# Altium footprint library 2019-09-10_11-11-09.PcbLib: 3 footprints
Each footprint in its own frame and in the unit in brackets; x right, y up, seen from the top. Pads: shape width x height; smd on the part's side, far side on the other; paste and mask are expansions set on the pad; w line width, h text height; cw(c..) or ccw(c..) is an arc to the next point about the centre after c.
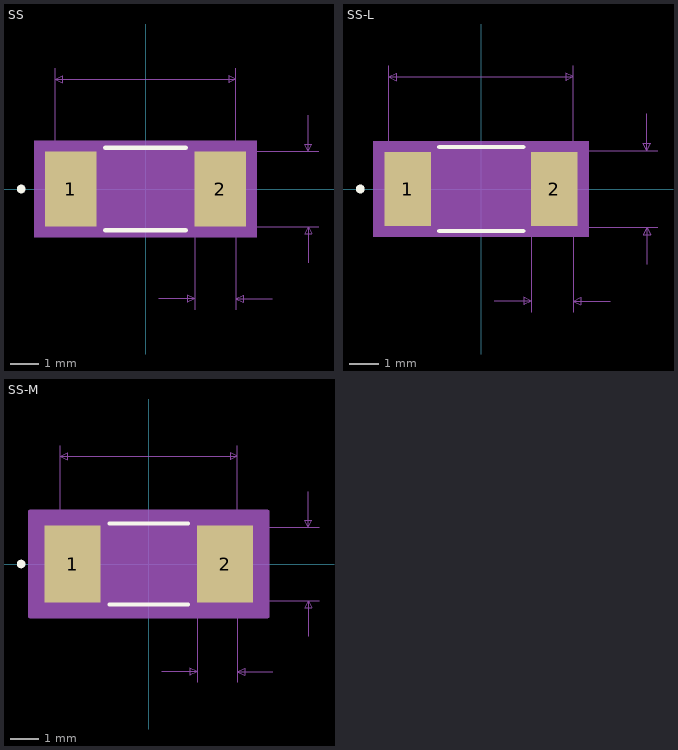
[diagram p0: the footprints below, top view; thin cyan lines are the x and y axes]

## SS [mil]
pads (2):
  rect 71x104 smd paste+0 mask+0: 1(-103.5,0) 2(103.5,0)
Top Overlay:
  circle w6: c-172,0 r3
  lines w6: -55.89,-57 55.89,-57 ; -55.89,57 55.89,57
Mechanical 5:
  region: 154,-67 -154,-67 -154,67 154,67
Mechanical 7:
  lines w1: -125,0 -125,167 ; 0,-52 240,-52 ; 0,52 240,52 ; 18,-152 68,-152 ; 68,-167 68,0 ; 125,-167 125,0 125,167 ; 175,-152 125,-152 ; 225,-102 225,-52 ; 225,102 225,52 ; -125,152 125,152 ; -125,152 -115,157 -115,147 -125,152 ; 68,-152 58,-147 58,-157 68,-152 ; 125,-152 135,-147 135,-157 125,-152 ; 125,152 115,157 115,147 125,152 ; 225,-52 220,-62 230,-62 225,-52 ; 225,52 220,62 230,62 225,52
  text "Default Padstyle: RX71Y104D0T" at -362.5,-322 h50
  text "Alt 1 Padstyle: OX60Y90D30P" at -337.5,-382 h50
  text "Alt 2 Padstyle: OX90Y60D30P" at -337.5,-442 h50
  text "0.104in/2.642mm" at 245,-12.5 h25
  text "0.25in/6.35mm" at -81.25,172 h25
  text "0.057in/1.448mm" at 2.75,-197 h25
Mechanical 13:
  circle w0: c-115,0 r3
  lines w1: -125,-52 -125,52 ; -125,-52 -68,-52 -68,52 -125,52 ; -125,-52 125,-52 ; -125,-52 -125,52 ; -125,52 125,52 ; 125,-52 68,-52 68,52 125,52 ; 125,-52 125,52 ; 125,-52 125,52
Mechanical 15:
  region: 149,-62 -149,-62 -149,62 149,62
  lines w6: -149,-62 -149,62 149,62 149,-62 -149,-62
3D body: height 10, standoff 0, extent 0,0 10,10

## SS-L [mil]
pads (2):
  rect 63x100 smd paste+0 mask+0: 1(-99.5,0) 2(99.5,0)
Top Overlay:
  circle w6: c-164,0 r3
  lines w6: -56.93,-57 56.93,-57 ; -56.93,57 56.93,57
Mechanical 5:
  region: 146,-65 -146,-65 -146,65 146,65
Mechanical 7:
  lines w1: -125,0 -125,167 ; 0,-52 240,-52 ; 0,52 240,52 ; 18,-152 68,-152 ; 68,-167 68,0 ; 125,-167 125,0 125,167 ; 175,-152 125,-152 ; 225,-102 225,-52 ; 225,102 225,52 ; -125,152 125,152 ; -125,152 -115,157 -115,147 -125,152 ; 68,-152 58,-147 58,-157 68,-152 ; 125,-152 135,-147 135,-157 125,-152 ; 125,152 115,157 115,147 125,152 ; 225,-52 220,-62 230,-62 225,-52 ; 225,52 220,62 230,62 225,52
  text "Default Padstyle: RX63Y100D0T" at -362.5,-320 h50
  text "Alt 1 Padstyle: OX60Y90D30P" at -337.5,-380 h50
  text "Alt 2 Padstyle: OX90Y60D30P" at -337.5,-440 h50
  text "0.104in/2.642mm" at 245,-12.5 h25
  text "0.25in/6.35mm" at -81.25,172 h25
  text "0.057in/1.448mm" at 2.75,-197 h25
Mechanical 13:
  circle w0: c-115,0 r3
  lines w1: -125,-52 -125,52 ; -125,-52 -68,-52 -68,52 -125,52 ; -125,-52 125,-52 ; -125,-52 -125,52 ; -125,52 125,52 ; 125,-52 68,-52 68,52 125,52 ; 125,-52 125,52 ; 125,-52 125,52
Mechanical 15:
  region: 135,-54 -135,-54 -135,54 135,54
  lines w6: -135,-54 -135,54 135,54 135,-54 -135,-54
3D body: height 10, standoff 0, extent 0,0 10,10

## SS-M [mil]
pads (2):
  rect 79x108 smd paste+0 mask+0: 1(-107.5,0) 2(107.5,0)
Top Overlay:
  circle w6: c-180,0 r3
  lines w6: -55.25,-57 55.25,-57 ; -55.25,57 55.25,57
Mechanical 5:
  region: 162,-69 -162,-69 -162,69 162,69
Mechanical 7:
  lines w1: -125,0 -125,167 ; 0,-52 240,-52 ; 0,52 240,52 ; 18,-152 68,-152 ; 68,-167 68,0 ; 125,-167 125,0 125,167 ; 175,-152 125,-152 ; 225,-102 225,-52 ; 225,102 225,52 ; -125,152 125,152 ; -125,152 -115,157 -115,147 -125,152 ; 68,-152 58,-147 58,-157 68,-152 ; 125,-152 135,-147 135,-157 125,-152 ; 125,152 115,157 115,147 125,152 ; 225,-52 220,-62 230,-62 225,-52 ; 225,52 220,62 230,62 225,52
  text "Default Padstyle: RX79Y108D0T" at -362.5,-324 h50
  text "Alt 1 Padstyle: OX60Y90D30P" at -337.5,-384 h50
  text "Alt 2 Padstyle: OX90Y60D30P" at -337.5,-444 h50
  text "0.104in/2.642mm" at 245,-12.5 h25
  text "0.25in/6.35mm" at -81.25,172 h25
  text "0.057in/1.448mm" at 2.75,-197 h25
Mechanical 13:
  circle w0: c-115,0 r3
  lines w1: -125,-52 -125,52 ; -125,-52 -68,-52 -68,52 -125,52 ; -125,-52 125,-52 ; -125,-52 -125,52 ; -125,52 125,52 ; 125,-52 68,-52 68,52 125,52 ; 125,-52 125,52 ; 125,-52 125,52
Mechanical 15:
  region: 167,-74 -167,-74 -167,74 167,74
  lines w6: -167,-74 -167,74 167,74 167,-74 -167,-74
3D body: height 10, standoff 0, extent 0,0 10,10